# Altium schematic symbol library 4.7k 0805 resistor.SchLib: 1 symbol
Pins are listed as number, name and electrical type; pins without a type are passive.

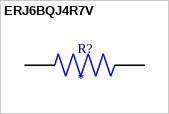
[diagram p0: symbol ERJ6BQJ4R7V]

## ERJ6BQJ4R7V
designator R?
MP: ERJ6BQJ4R7V; Value: *; Availability: Unavailable; Price: None; Package: None
footprint RES_ERJ6BQJ4R7V
pins: 1, 2